# Altium footprint library MLP91002.PcbLib: 1 footprints
Each footprint in its own frame and in the unit in brackets; x right, y up, seen from the top. Pads: shape width x height; smd on the part's side, far side on the other; paste and mask are expansions set on the pad; w line width, h text height; cw(c..) or ccw(c..) is an arc to the next point about the centre after c.
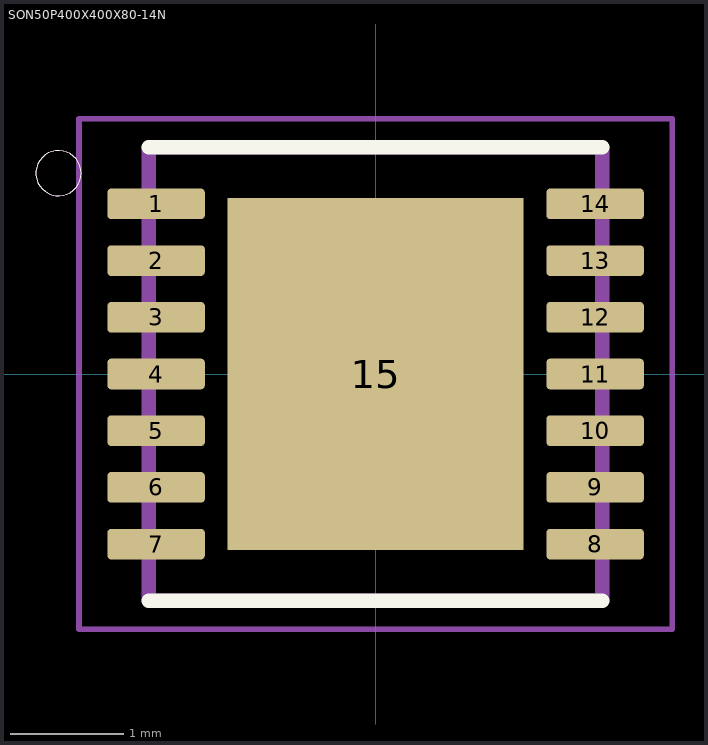
[diagram p0: the footprint, top view; thin cyan lines are the x and y axes]

## SON50P400X400X80-14N [mm]
pads (15):
  rrect25% 0.86x0.27 smd: 1(-1.935,1.5) 2(-1.935,1) 3(-1.935,0.5) 4(-1.935,0) 5(-1.935,-0.5) 6(-1.935,-1) 7(-1.935,-1.5) 8(1.935,-1.5) 9(1.935,-1) 10(1.935,-0.5) 11(1.935,0) 12(1.935,0.5) 13(1.935,1) 14(1.935,1.5)
  rect 2.61x3.1 smd paste-3: 15(0,0)
Top Overlay:
  circle w0: c-2.795,1.77 r0.2
  lines w0.127: -2,-2 2,-2 ; -2,2 2,2
Top Paste:
  region: 0.653,-0.819 -0.69,-0.819 -0.69,0.775 0.653,0.775
Assembly Top:
  circle w0: c-2.795,1.77 r0.2
  lines w0.127: -2,-2 2,-2 2,2 -2,2 -2,-2
Courtyard Top:
  lines w0.05: -2.615,-2.25 2.615,-2.25 2.615,2.25 -2.615,2.25 -2.615,-2.25
3D body "step_temp.STEP": height 0.8, standoff 0, extent -2,-2 2,2